# Altium schematic symbol library BLM31PG601SN1L.SchLib: 1 symbol
Pins are listed as number, name and electrical type; pins without a type are passive.

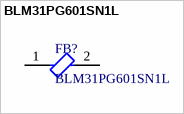
[diagram p0: symbol BLM31PG601SN1L]

## BLM31PG601SN1L
designator FB?
Chip Ferrite Bead Array, 1206, 600Ω @ 100MHz, 0.08Ω, 25%, 1.5A
footprint FP-BLM31-0_2-t1_1-IPC_A
footprint FP-BLM31-0_2-t1_1-IPC_B
footprint FP-BLM31-0_2-t1_1-IPC_C
footprint FP-BLM31-0_2-t1_1-MFG
pins: 1, 2